# Altium footprint library leaded.PcbLib: 197 footprints (part 3 of 13)
Each footprint in its own frame and in the unit in brackets; x right, y up, seen from the top. Pads: shape width x height; smd on the part's side, far side on the other; paste and mask are expansions set on the pad; w line width, h text height; cw(c..) or ccw(c..) is an arc to the next point about the centre after c.
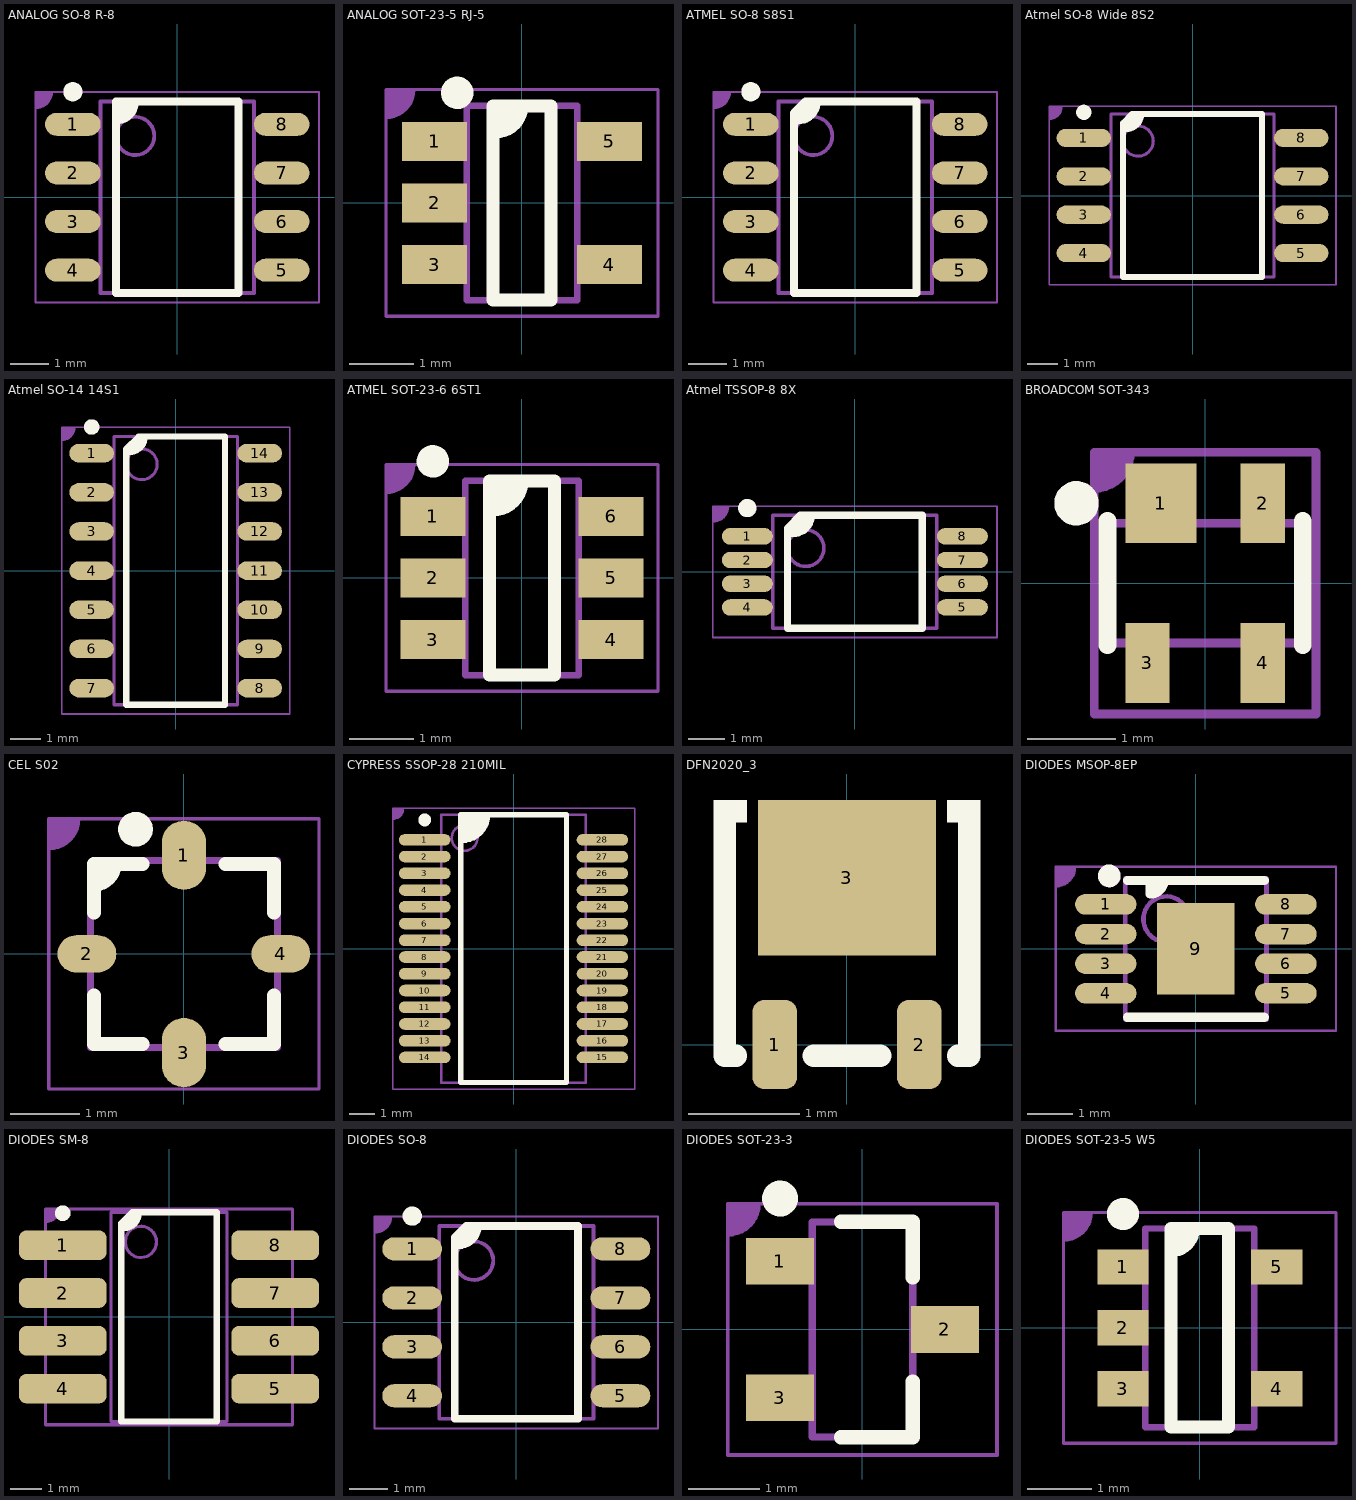
[diagram p2: the footprints below, top view; thin cyan lines are the x and y axes]

## ANALOG SO-8 R-8 [mm] "SOIC, 8-Leads, Body 4.90x3.90mm, Pitch 1.27mm, IPC Medium Density"
height 1.75
pads (8):
  oval 1.45x0.6 smd: 1(-2.725,1.905) 2(-2.725,0.635) 3(-2.725,-0.635) 4(-2.725,-1.905) 5(2.725,-1.905) 6(2.725,-0.635) 7(2.725,0.635) 8(2.725,1.905)
Top Overlay:
  circle w0.25: c-2.725,2.755 r0.125
  region: -1.6,2.5 -1.1,2.5 -1.1,2.3 -1.4,2 -1.6,2
  lines w0.2: -1.6,2 ccw(c-1.6,2.5) -1.1,2.5 ; -1.6,-2.5 -1.6,2.5 1.6,2.5 1.6,-2.5 -1.6,-2.5
Mechanical 13:
  circle w0.1: c-1.1,1.6 r0.5
  lines w0.1: -2,-2.5 -2,2.5 2,2.5 2,-2.5 -2,-2.5
Top Component (Mech14):
  region: -3.7,2.75 -3.7,2.312 -3.617,2.312 -3.566,2.363 -3.483,2.363 -3.305,2.541 -3.305,2.631 -3.269,2.668 -3.269,2.75
  lines w0.05: -3.7,-2.75 -3.7,2.75 3.7,2.75 3.7,-2.75 -3.7,-2.75
  lines w0.051: -3.7,2.319 ccw(c-3.7,2.75) -3.269,2.75
  text ".Designator" at -0.61,-0.406 h1.52
3D body "ANALOG SO-8 R-8.step": height 1.75, standoff 0, extent -3,-2.5 3,2.5

## ANALOG SOT-23-5 RJ-5 [mm] "SOT23, 5-Leads, Body 2.90x2.80mm, Pitch 0.95mm, IPC Medium Density"
height 1.3
pads (5):
  rect 1x0.6 smd: 1(-1.35,0.95) 2(-1.35,0) 3(-1.35,-0.95) 4(1.35,-0.95) 5(1.35,0.95)
Top Overlay:
  circle w0.25: c-1,1.7 r0.125
  region: -0.45,1.5 0,1.5 0,1.4 -0.3,1.1 -0.45,1.1
  lines w0.2: -0.45,1.1 -0.4,1.1 ccw(c-0.4,1.5) 0,1.5 ; -0.45,-1.5 0.45,-1.5 0.45,1.5 -0.45,1.5 -0.45,-1.5
Mechanical 13:
  lines w0.1: -0.85,-1.5 -0.85,1.5 0.85,1.5 0.85,-1.5 -0.85,-1.5
Top Component (Mech14):
  region: -2.1,1.75 -2.1,1.312 -2.017,1.312 -1.966,1.363 -1.883,1.363 -1.705,1.541 -1.705,1.631 -1.669,1.668 -1.669,1.75
  lines w0.05: -2.1,-1.75 -2.1,1.75 2.1,1.75 2.1,-1.75 -2.1,-1.75
  lines w0.051: -2.1,1.319 ccw(c-2.1,1.75) -1.669,1.75
  text ".Designator" at -0.61,-0.406 h1.52
3D body "SOT-23-5.STEP": height 1.5, standoff 0, extent -1.411,-1.45 1.41,1.45

## ATMEL SO-8 S8S1 [mm] "SOIC, 8-Leads, Body 4.89x3.90mm, Pitch 1.27mm, IPC Medium Density"
height 1.75
pads (8):
  oval 1.45x0.6 smd: 1(-2.725,1.905) 2(-2.725,0.635) 3(-2.725,-0.635) 4(-2.725,-1.905) 5(2.725,-1.905) 6(2.725,-0.635) 7(2.725,0.635) 8(2.725,1.905)
Top Overlay:
  circle w0.25: c-2.725,2.755 r0.125
  region: -1.3,2.5 -1,2.5 -1,2.401 -1.076,2.217 -1.217,2.076 -1.401,2 -1.5,2 -1.6,2 -1.6,2.2
  lines w0.2: -1.6,2 -1.5,2 ccw(c-1.5,2.5) -1,2.5 ; -1.6,-2.5 1.6,-2.5 1.6,2.5 -1.3,2.5 -1.6,2.2 -1.6,-2.5
Mechanical 13:
  circle w0.1: c-1.1,1.6 r0.5
  lines w0.1: -2,-2.5 -2,2.5 2,2.5 2,-2.5 -2,-2.5
Top Component (Mech14):
  region: -3.7,2.75 -3.7,2.312 -3.617,2.312 -3.566,2.363 -3.483,2.363 -3.305,2.541 -3.305,2.631 -3.269,2.668 -3.269,2.75
  lines w0.05: -3.7,-2.75 -3.7,2.75 3.7,2.75 3.7,-2.75 -3.7,-2.75
  lines w0.051: -3.7,2.319 ccw(c-3.7,2.75) -3.269,2.75
  text ".Designator" at -0.61,-0.406 h1.52
3D body "SO-8.STEP": height 1.5, standoff 0, extent -3.014,-2.45 3.014,2.45

## Atmel SO-8 Wide 8S2 [mm] "SOIC, 8-Leads, Body 5.24x5.29mm, Pitch 1.27mm, IPC Medium Density"
height 2.16
pads (8):
  oval 1.8x0.6 smd: 1(-3.6,1.905) 2(-3.6,0.635) 3(-3.6,-0.635) 4(-3.6,-1.905) 5(3.6,-1.905) 6(3.6,-0.635) 7(3.6,0.635) 8(3.6,1.905)
Top Overlay:
  circle w0.25: c-3.6,2.755 r0.125
  region: -2,2.7 -1.7,2.7 -1.7,2.601 -1.776,2.417 -1.917,2.276 -2.101,2.2 -2.2,2.2 -2.3,2.2 -2.3,2.4
  lines w0.2: -2.3,2.2 -2.2,2.2 ccw(c-2.2,2.7) -1.7,2.7 ; -2.3,-2.7 2.3,-2.7 2.3,2.7 -2,2.7 -2.3,2.4 -2.3,-2.7
Mechanical 13:
  circle w0.1: c-1.8,1.8 r0.5
  lines w0.1: -2.7,-2.7 2.7,-2.7 2.7,2.7 -2.7,2.7 -2.7,-2.7
Top Component (Mech14):
  region: -4.75,2.95 -4.75,2.512 -4.667,2.512 -4.616,2.563 -4.533,2.563 -4.355,2.741 -4.355,2.831 -4.319,2.868 -4.319,2.95
  lines w0.05: -4.75,-2.95 4.75,-2.95 4.75,2.95 -4.75,2.95 -4.75,-2.95
  lines w0.051: -4.75,2.519 ccw(c-4.75,2.95) -4.319,2.95
  text ".Designator" at -0.61,-0.406 h1.52
3D body "SO-8 208mil.STEP": height 1.5, standoff 0, extent -4.014,-2.642 4.014,2.641

## Atmel SO-14 14S1 [mm] "SOIC, 14-Leads, Body 8.65x3.90mm, Pitch 1.27mm, IPC Medium Density"
height 1.75
pads (14):
  oval 1.45x0.6 smd: 1(-2.725,3.81) 2(-2.725,2.54) 3(-2.725,1.27) 4(-2.725,0) 5(-2.725,-1.27) 6(-2.725,-2.54) 7(-2.725,-3.81) 8(2.725,-3.81) 9(2.725,-2.54) 10(2.725,-1.27) 11(2.725,0) 12(2.725,1.27) 13(2.725,2.54) 14(2.725,3.81)
Top Overlay:
  circle w0.25: c-2.725,4.66 r0.125
  region: -1.3,4.35 -1,4.35 -1,4.251 -1.076,4.067 -1.217,3.926 -1.401,3.85 -1.5,3.85 -1.6,3.85 -1.6,4.05
  lines w0.2: -1.6,3.85 -1.5,3.85 ccw(c-1.5,4.35) -1,4.35 ; -1.6,-4.35 -1.6,3.95 -1.2,4.35 1.6,4.35 1.6,-4.35 -1.6,-4.35
Mechanical 13:
  circle w0.1: c-1.1,3.45 r0.5
  lines w0.1: -2,-4.35 2,-4.35 2,4.35 -2,4.35 -2,-4.35
Top Component (Mech14):
  region: -3.7,4.65 -3.7,4.212 -3.617,4.212 -3.566,4.263 -3.483,4.263 -3.305,4.441 -3.305,4.531 -3.269,4.568 -3.269,4.65
  lines w0.05: -3.7,-4.65 -3.7,4.65 3.7,4.65 3.7,-4.65 -3.7,-4.65
  lines w0.051: -3.7,4.219 ccw(c-3.7,4.65) -3.269,4.65
  text ".Designator" at -0.61,-0.406 h1.52
3D body "SO-14 150mil Wide.STEP": height 1.65, standoff 0, extent -3.01,-4.325 3.01,4.325

## ATMEL SOT-23-6 6ST1 [mm] "SOT23, 6-Leads, Body 2.90x2.80mm, Pitch 0.95mm, IPC Medium Density"
height 1.45
pads (6):
  rect 1x0.6 smd: 1(-1.375,0.95) 2(-1.375,0) 3(-1.375,-0.95) 4(1.375,-0.95) 5(1.375,0) 6(1.375,0.95)
Top Overlay:
  circle w0.25: c-1.375,1.8 r0.125
  region: -0.5,1.5 0,1.5 0,1.35 -0.3,1.05 -0.5,1.05
  lines w0.2: -0.5,1.05 -0.45,1.05 ccw(c-0.45,1.5) 0,1.5 ; -0.5,-1.5 -0.5,1.5 0.5,1.5 0.5,-1.5 -0.5,-1.5
Mechanical 13:
  lines w0.1: -0.875,-1.5 0.875,-1.5 0.875,1.5 -0.875,1.5 -0.875,-1.5
Top Component (Mech14):
  region: -2.1,1.75 -2.1,1.312 -2.017,1.312 -1.966,1.363 -1.883,1.363 -1.705,1.541 -1.705,1.631 -1.669,1.668 -1.669,1.75
  lines w0.05: -2.1,-1.75 -2.1,1.75 2.1,1.75 2.1,-1.75 -2.1,-1.75
  lines w0.051: -2.1,1.319 ccw(c-2.1,1.75) -1.669,1.75
  text ".Designator" at -0.61,-0.406 h1.52
3D body "sot-23-6-atmel.STEP": height 1.45, standoff 0, extent -1.41,-1.45 1.41,1.45

## Atmel TSSOP-8 8X [mm] "TSSOP, 8-Leads, Body 3.00x4.40mm, Pitch 0.65mm, IPC Medium Density"
height 1.2
pads (8):
  oval 1.4x0.45 smd: 1(-2.95,0.975) 2(-2.95,0.325) 3(-2.95,-0.325) 4(-2.95,-0.975) 5(2.95,-0.975) 6(2.95,-0.325) 7(2.95,0.325) 8(2.95,0.975)
Top Overlay:
  circle w0.25: c-2.95,1.75 r0.125
  region: -1.5,1.55 -1.2,1.55 -1.2,1.451 -1.276,1.267 -1.417,1.126 -1.601,1.05 -1.7,1.05 -1.8,1.05 -1.8,1.25
  lines w0.2: -1.8,1.05 -1.7,1.05 ccw(c-1.7,1.55) -1.2,1.55 ; -1.85,-1.55 1.85,-1.55 1.85,1.55 -1.5,1.55 -1.85,1.2 -1.85,-1.55
Mechanical 13:
  circle w0.1: c-1.35,0.65 r0.5
  lines w0.1: -2.25,-1.55 -2.25,1.55 2.25,1.55 2.25,-1.55 -2.25,-1.55
Top Component (Mech14):
  region: -3.9,1.8 -3.9,1.362 -3.817,1.362 -3.766,1.413 -3.683,1.413 -3.505,1.591 -3.505,1.681 -3.469,1.718 -3.469,1.8
  lines w0.05: -3.9,-1.8 -3.9,1.8 3.9,1.8 3.9,-1.8 -3.9,-1.8
  lines w0.051: -3.9,1.369 ccw(c-3.9,1.8) -3.469,1.8
  text ".Designator" at -0.61,-0.406 h1.52
3D body "TSSOP-8.STEP": height 1.2, standoff 0, extent -3.21,-1.5 3.211,1.5

## BROADCOM SOT-343 [mm] "SOT343, 4-Leads, Body 2.3x2.4mm (max), Pitch 1.30mm, IPC High Density"
height 1.2
pads (4):
  rect 0.8x0.9 smd: 1(-0.5,0.9)
  rect 0.5x0.9 smd: 2(0.65,0.9) 3(-0.65,-0.9) 4(0.65,-0.9)
Top Overlay:
  circle w0.25: c-1.45,0.9 r0.125
  lines w0.2: -1.1,-0.7 -1.1,0.7 ; 1.1,-0.7 1.1,0.7
Mechanical 13:
  lines w0.1: -1.125,-0.675 1.125,-0.675 1.125,0.675 -1.125,0.675 -1.125,-0.675
Top Component (Mech14):
  region: -1.25,1.475 -1.25,1.037 -1.166,1.037 -1.116,1.088 -1.033,1.088 -0.855,1.266 -0.855,1.356 -0.819,1.393 -0.819,1.475
  lines w0.051: -1.25,1.044 ccw(c-1.25,1.475) -0.819,1.475
  lines w0.1: -1.25,-1.475 1.25,-1.475 1.25,1.475 -1.25,1.475 -1.25,-1.475
  text ".Designator" at -0.406,-0.279 h1.02
3D body "SOT343-4.STEP": height 1, standoff 0, extent -1.1,-1.1 1.1,1.1

## CEL S02 [mm] "S02, 4-Leads, Body 3.20x3.20mm, Pitch 1.270mm, IPC High Density"
height 1.5
pads (4):
  oval 0.64x1 smd: 1(0,1.425) 3(0,-1.425)
  oval 0.85x0.54 smd: 2(-1.4,0) 4(1.4,0)
Top Overlay:
  circle w0.25: c-0.7,1.8 r0.125
  region: -1,1.3 -1.3,1.3 -1.3,1 -1.2,1 -1,1.2
  lines w0.2: -1.3,-0.6 -1.3,-1.3 -0.6,-1.3 ; -1.3,0.6 -1.3,1.3 -0.6,1.3 ; -1.3,1 ccw(c-1.3,1.3) -1,1.3 ; 0.6,-1.3 1.3,-1.3 1.3,-0.6 ; 0.6,1.3 1.3,1.3 1.3,0.6
Mechanical 13:
  lines w0.1: -1.35,-1.35 -1.35,0.95 -0.95,1.35 1.35,1.35 1.35,-1.35 -1.35,-1.35
Top Component (Mech14):
  region: -1.95,1.95 -1.95,1.512 -1.867,1.512 -1.816,1.563 -1.733,1.563 -1.555,1.741 -1.555,1.831 -1.519,1.868 -1.519,1.95
  lines w0.05: -1.95,-1.95 -1.95,1.95 1.95,1.95 1.95,-1.95 -1.95,-1.95
  lines w0.051: -1.95,1.519 ccw(c-1.95,1.95) -1.519,1.95
  text ".Designator" at -0.61,-0.406 h1.52
3D body "CEL S02 MiniX.STEP": height 1.5, standoff -0.01, extent -1.6,-1.6 1.6,1.6

## CYPRESS SSOP-28 210MIL [mm] "SOP, 28-Leads, Body 10.2x5.3mm, Pitch 0.65mm, IPC Medium Density"
height 2
pads (28):
  oval 2x0.45 smd: 1(-3.45,4.225) 2(-3.45,3.575) 3(-3.45,2.925) 4(-3.45,2.275) 5(-3.45,1.625) 6(-3.45,0.975) 7(-3.45,0.325) 8(-3.45,-0.325) 9(-3.45,-0.975) 10(-3.45,-1.625) 11(-3.45,-2.275) 12(-3.45,-2.925) 13(-3.45,-3.575) 14(-3.45,-4.225) 15(3.45,-4.225) 16(3.45,-3.575) 17(3.45,-2.925) 18(3.45,-2.275) 19(3.45,-1.625) 20(3.45,-0.975) 21(3.45,-0.325) 22(3.45,0.325) 23(3.45,0.975) 24(3.45,1.625) 25(3.45,2.275) 26(3.45,2.925) 27(3.45,3.575) 28(3.45,4.225)
Top Overlay:
  circle w0.25: c-3.45,5 r0.125
  region: -2.05,5.2 -2.05,4.2 -1.6,4.2 -1,4.8 -1,5.2
  lines w0.2: -2.05,4.2 -2,4.2 ccw(c-2,5.2) -1,5.2 ; -2.05,-5.2 2.05,-5.2 2.05,5.2 -2.05,5.2 -2.05,-5.2
Mechanical 13:
  circle w0.1: c-1.9,4.3 r0.5
  lines w0.1: -2.8,-5.2 2.8,-5.2 2.8,5.2 -2.8,5.2 -2.8,-5.2
Top Component (Mech14):
  region: -4.7,5.45 -4.7,5.012 -4.617,5.012 -4.566,5.063 -4.483,5.063 -4.305,5.241 -4.305,5.331 -4.269,5.368 -4.269,5.45
  lines w0.05: -4.7,-5.45 -4.7,5.45 4.7,5.45 4.7,-5.45 -4.7,-5.45
  lines w0.051: -4.7,5.019 ccw(c-4.7,5.45) -4.269,5.45
  text ".Designator" at -0.61,-0.406 h1.52
3D body "SSOP-28-TI-DB.STEP": height 1.97, standoff 0, extent -3.91,-5.1 3.911,5.1

## DFN2020_3 [mm] "DFN2020D-3, SOT1061D, Body 2X2X0.65mm,"
height 0.65
pads (3):
  rrect50% 0.4x0.8 smd mask+0.075: 1(-0.65,0) 2(0.65,0)
  rect 1.6x1.4 smd mask+0.075: 3(0,1.5)
Top Overlay:
  region: 1.2,2.2 0.9,2.2 0.9,2 1.2,2
  rectangle: -1.2,2 -0.9,2.2
  lines w0.2: -1.1,2.1 -1.1,-0.1 -1,-0.1 ; -0.3,-0.1 0.3,-0.1 ; 1,-0.1 1.1,-0.1 1.1,2.1
3D body "User Library-SOT1061.step": height 0.65, standoff 0, extent -1,0 1,2.002

## DIODES MSOP-8EP [mm] "MSOP, 8-Leads, Body 3.00x3.00mm, Pitch 0.65mm, Thermal Pad 2.00x1.70mm, IPC Medium Density"
height 1.1
pads (9):
  oval 1.35x0.45 smd: 1(-1.975,0.975) 2(-1.975,0.325) 3(-1.975,-0.325) 4(-1.975,-0.975) 5(1.975,-0.975) 6(1.975,-0.325) 7(1.975,0.325) 8(1.975,0.975)
  rect 1.7x2 smd: 9(0,0)
Top Overlay:
  circle w0.25: c-1.9,1.6 r0.125
  region: -0.7,1.5 -1,1.5 -1,1.2
  lines w0.2: -1.5,-1.5 1.5,-1.5 ; -1.5,1.5 1.5,1.5 ; -1,1.5 -1,1.2 ccw(c-1,1.5) -0.7,1.5
Mechanical 13:
  circle w0.1: c-0.65,0.65 r0.5
  lines w0.1: -1.55,-1.55 1.55,-1.55 1.55,1.55 -1.55,1.55 -1.55,-1.55
Top Component (Mech14):
  region: -3.075,1.8 -3.075,1.362 -2.992,1.362 -2.941,1.413 -2.858,1.413 -2.68,1.591 -2.68,1.681 -2.644,1.718 -2.644,1.8
  lines w0.05: -3.075,-1.8 -3.075,1.8 3.075,1.8 3.075,-1.8 -3.075,-1.8
  lines w0.051: -3.075,1.369 ccw(c-3.075,1.8) -2.644,1.8
  text ".Designator" at -0.61,-0.406 h1.52
3D body "MSOP-8.STEP": height 1.1, standoff 0, extent -2.46,-1.5 2.46,1.5

## DIODES SM-8 [mm] "SOP, 8-Leads, Body 6.7x3.7mm (max), Pitch 1.53mm, IPC High Density"
height 1.7
pads (8):
  rrect50% 2.8x0.95 smd: 1(-3.4,2.295) 2(-3.4,0.765) 3(-3.4,-0.765) 4(-3.4,-2.295) 5(3.4,-2.295) 6(3.4,-0.765) 7(3.4,0.765) 8(3.4,2.295)
Top Overlay:
  circle w0.25: c-3.4,3.32 r0.125
  region: -1.325,3.2 -0.975,3.3 -0.975,3.15 -1.275,2.85 -1.475,2.85
  lines w0.2: -1.475,2.85 -1.425,2.85 ccw(c-1.425,3.3) -0.975,3.3 ; -1.525,-3.35 -1.525,3 -1.175,3.35 1.525,3.35 1.525,-3.35 -1.525,-3.35
Mechanical 13:
  circle w0.1: c-0.9,2.4 r0.5
  lines w0.1: -1.85,-3.35 -1.85,3.35 1.85,3.35 1.85,-3.35 -1.85,-3.35
Top Component (Mech14):
  region: -3.95,3.45 -3.95,3.012 -3.867,3.012 -3.816,3.063 -3.733,3.063 -3.555,3.241 -3.555,3.331 -3.519,3.368 -3.519,3.45
  lines w0.051: -3.95,3.019 ccw(c-3.95,3.45) -3.519,3.45
  lines w0.1: -3.95,-3.45 -3.95,3.45 3.95,3.45 3.95,-3.45 -3.95,-3.45
  text ".Designator" at -0.61,-0.406 h1.52
3D body "SM8.STEP": height 1.7, standoff 0, extent -3.548,-3.25 3.549,3.25

## DIODES SO-8 [mm] "SOIC, 8-Leads, Body 4.90x3.90mm, Pitch 1.27mm, IPC Medium Density"
height 1.75
pads (8):
  oval 1.55x0.6 smd: 1(-2.7,1.905) 2(-2.7,0.635) 3(-2.7,-0.635) 4(-2.7,-1.905) 5(2.7,-1.905) 6(2.7,-0.635) 7(2.7,0.635) 8(2.7,1.905)
Top Overlay:
  circle w0.25: c-2.7,2.755 r0.125
  region: -1.3,2.5 -1,2.5 -1,2.401 -1.076,2.217 -1.217,2.076 -1.401,2 -1.5,2 -1.6,2 -1.6,2.2
  lines w0.2: -1.6,2 -1.5,2 ccw(c-1.5,2.5) -1,2.5 ; -1.6,-2.5 1.6,-2.5 1.6,2.5 -1.3,2.5 -1.6,2.2 -1.6,-2.5
Mechanical 13:
  circle w0.1: c-1.1,1.6 r0.5
  lines w0.1: -2,-2.5 -2,2.5 2,2.5 2,-2.5 -2,-2.5
Top Component (Mech14):
  region: -3.675,2.75 -3.675,2.312 -3.592,2.312 -3.541,2.363 -3.458,2.363 -3.28,2.541 -3.28,2.631 -3.244,2.668 -3.244,2.75
  lines w0.05: -3.675,-2.75 -3.675,2.75 3.675,2.75 3.675,-2.75 -3.675,-2.75
  lines w0.051: -3.675,2.319 ccw(c-3.675,2.75) -3.244,2.75
  text ".Designator" at -0.61,-0.406 h1.52
3D body "SO-8.STEP": height 1.5, standoff 0, extent -3.014,-2.45 3.014,2.45

## DIODES SOT-23-3 [mm] "SOT23, 3-Leads, Body 2.90x2.40mm, Pitch 0.95mm, IPC Medium Density"
height 1.35
pads (3):
  rect 0.95x0.65 smd: 1(-1.15,0.95) 2(1.15,0) 3(-1.15,-0.95)
Top Overlay:
  circle w0.25: c-1.15,1.825 r0.125
  lines w0.2: -0.3,-1.5 0.7,-1.5 0.7,-0.725 ; -0.3,1.5 0.7,1.5 0.7,0.725
Mechanical 13:
  lines w0.1: -0.7,-1.5 -0.7,1.5 0.7,1.5 0.7,-1.5 -0.7,-1.5
Top Component (Mech14):
  region: -1.875,1.75 -1.875,1.312 -1.792,1.312 -1.741,1.363 -1.658,1.363 -1.48,1.541 -1.48,1.631 -1.444,1.668 -1.444,1.75
  lines w0.05: -1.875,-1.75 -1.875,1.75 1.875,1.75 1.875,-1.75 -1.875,-1.75
  lines w0.051: -1.875,1.319 ccw(c-1.875,1.75) -1.444,1.75
  text ".Designator" at -0.61,-0.406 h1.52
3D body "sot-23-3.STEP": height 1.5, standoff 0, extent -1.41,-1.45 1.411,1.45

## DIODES SOT-23-5 W5 [mm] "SOT23, 5-Leads, Body 3.00x2.85mm, Pitch 0.95mm, IPC Medium Density"
height 1.3
pads (5):
  rect 0.8x0.55 smd: 1(-1.2,0.95) 2(-1.2,0) 3(-1.2,-0.95) 4(1.2,-0.95) 5(1.2,0.95)
Top Overlay:
  circle w0.25: c-1.2,1.775 r0.125
  region: -0.1,1.55 -0.4,1.55 -0.4,1.25 -0.45,1.2 -0.3,1.2 -0.2,1.3
  lines w0.2: -0.45,1.2 ccw(c-0.45,1.55) -0.1,1.55 ; -0.45,-1.55 0.45,-1.55 0.45,1.55 -0.45,1.55 -0.45,-1.55
Mechanical 13:
  lines w0.1: -0.85,-1.55 -0.85,1.55 0.85,1.55 0.85,-1.55 -0.85,-1.55
Top Component (Mech14):
  region: -2.125,1.8 -2.125,1.362 -2.042,1.362 -1.991,1.413 -1.908,1.413 -1.73,1.591 -1.73,1.681 -1.694,1.718 -1.694,1.8
  lines w0.05: -2.125,-1.8 2.125,-1.8 2.125,1.8 -2.125,1.8 -2.125,-1.8
  lines w0.051: -2.125,1.369 ccw(c-2.125,1.8) -1.694,1.8
  text ".Designator" at -0.61,-0.406 h1.52
3D body "SOT-23-5.STEP": height 1.5, standoff 0, extent -1.41,-1.45 1.411,1.45